# Altium schematic symbol library WIRE_Solder_8AWG.SchLib: 1 symbol
Pins are listed as number, name and electrical type; pins without a type are passive.

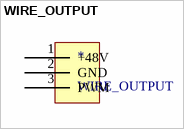
[diagram p0: symbol WIRE_OUTPUT]

## WIRE_OUTPUT
designator *
footprint PCBComponent_1
pins: 1 +48V, 2 GND, 3 PWM